# EAGLE library part MINI-USB-B (library pixel)
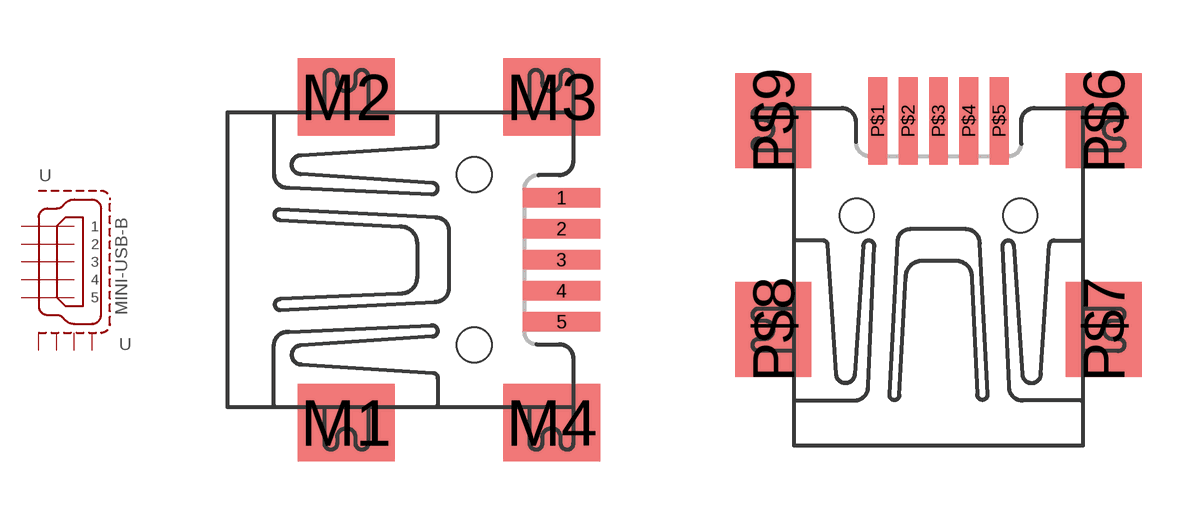
[diagram p23: symbol with the pads of MINI-USB-B; footprints MINI-USB-B, MINI-USB-B-2]

Designator prefix -

## MINI-USB-B  [MINI-USB-B]
1  1  in
2  2  in
3  3  in
4  4  in
5  5  in
M1  S1  pas
M2  S2  pas
M3  S3  pas
M4  S4  pas

## MINI-USB-B2  [MINI-USB-B-2]
P$1  1  in
P$2  2  in
P$3  3  in
P$4  4  in
P$5  5  in
P$6  S1  pas
P$7  S2  pas
P$8  S3  pas
P$9  S4  pas

## Footprint MINI-USB-B (pad centres in mm)
smd 2 x 0.5: 1 2.25,1.6; 2 2.25,0.8; 3 2.25,0; 4 2.25,-0.8; 5 2.25,-1.6
smd 2.5 x 2: M1 -3.3,-4.2; M2 -3.3,4.2; M3 2,4.2; M4 2,-4.2
hole 0.9 at 0,2.2
hole 0.9 at 0,-2.2

## Footprint MINI-USB-B-2 (pad centres in mm)
smd 0.5 x 2.3: P$1 -1.6,2.75; P$2 -0.8,2.75; P$3 0,2.75; P$4 0.8,2.75; P$5 1.6,2.75
smd 2 x 2.5: P$6 4.35,2.75; P$7 4.35,-2.75; P$8 -4.35,-2.75; P$9 -4.35,2.75
hole 0.9 at -2.159,0.254
hole 0.9 at 2.159,0.254